# Altium footprint library CS12ANW03.PcbLib: 1 footprints
Each footprint in its own frame and in the unit in brackets; x right, y up, seen from the top. Pads: shape width x height; smd on the part's side, far side on the other; paste and mask are expansions set on the pad; w line width, h text height; cw(c..) or ccw(c..) is an arc to the next point about the centre after c.
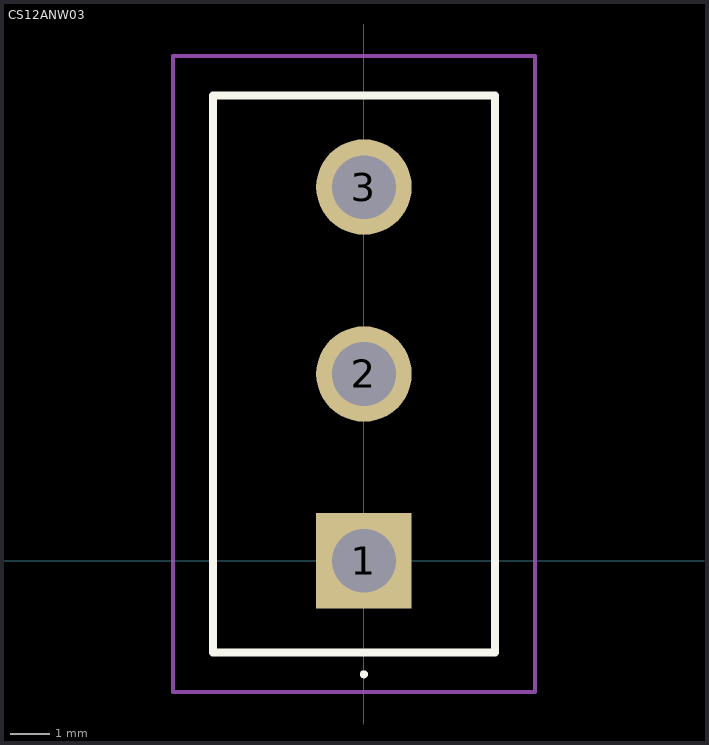
[diagram p0: the footprint, top view; thin cyan lines are the x and y axes]

## CS12ANW03 [mm]
pads (3):
  rect 2.4x2.4 hole 1.6: 1(0,0)
  round 2.4 hole 1.6: 2(0,4.7) 3(0,9.4)
Top Overlay:
  lines w0.1: 0,-2.9 cw(c0,-2.85) 0,-2.8 ; 0,-2.9 0,-2.9 ; 0,-2.9 ccw(c0,-2.85) 0,-2.8 ; 0,-2.8 0,-2.8
  lines w0.2: -3.8,-2.3 3.3,-2.3 3.3,11.7 -3.8,11.7 -3.8,-2.3
Mechanical 15:
  lines w0.1: -3.8,-2.3 3.3,-2.3 3.3,11.7 -3.8,11.7 -3.8,-2.3
Mechanical 20:
  lines w0.1: -4.8,-3.3 4.3,-3.3 4.3,12.7 -4.8,12.7 -4.8,-3.3